# Altium footprint library PcbLib1.PcbLib: 332 footprints (part 7 of 22)
Each footprint in its own frame and in the unit in brackets; x right, y up, seen from the top. Pads: shape width x height; smd on the part's side, far side on the other; paste and mask are expansions set on the pad; w line width, h text height; cw(c..) or ccw(c..) is an arc to the next point about the centre after c.
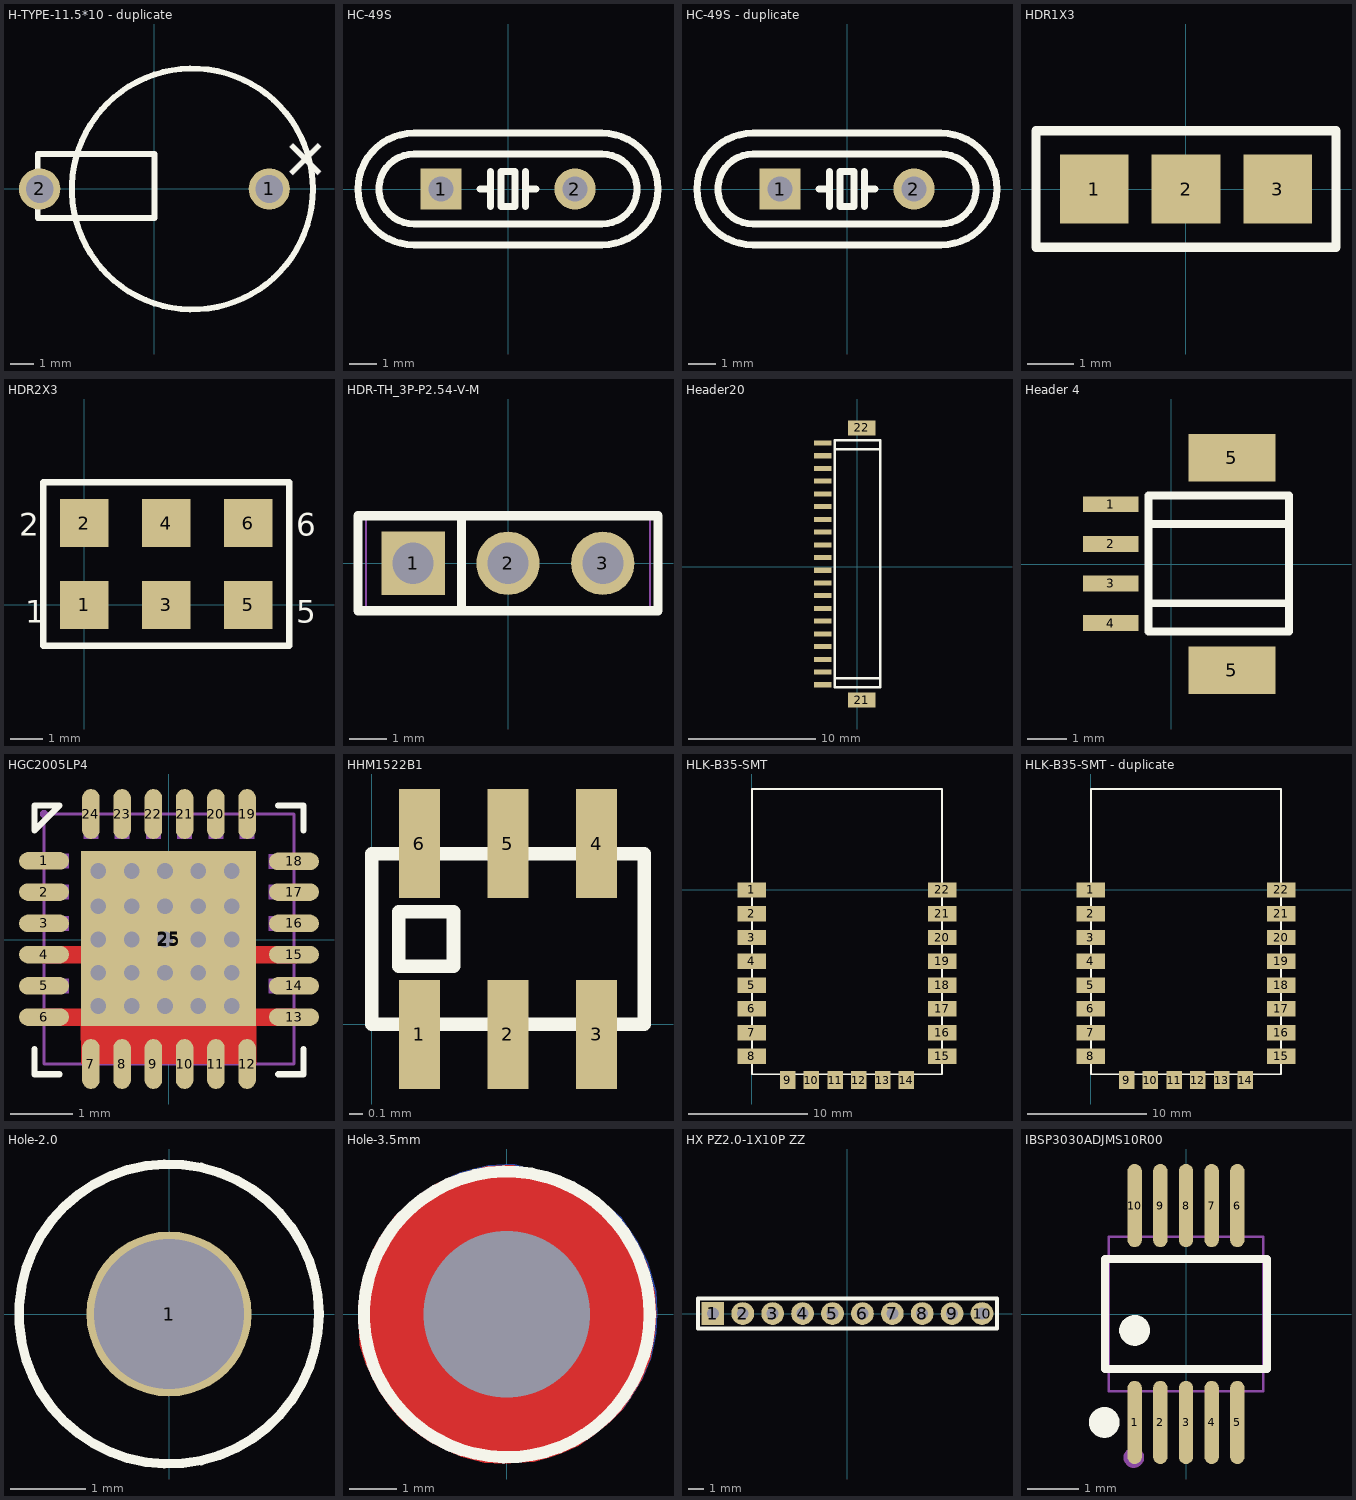
[diagram p6: the footprints below, top view; thin cyan lines are the x and y axes]

## H-TYPE-11.5*10 - duplicate [mm]
pads (2):
  round 1.8 hole 1.2: 1(5,0) 2(-5,0)
Top Overlay:
  circle w0.254: c1.65,0 r5.25
  lines w0.254: -5.08,-1.27 -5.08,1.524 0,1.524 0,-1.27 -5.08,-1.27
  text "+" at 5.135,1.499 h2.03

## HC-49S [mm]
pads (2):
  rect 1.5x1.5 hole 0.9: 1(-2.439,0)
  round 1.5 hole 0.9: 2(2.438,0)
Top Overlay:
  lines w0.254: -1.016,0 -0.635,0 ; -0.635,-0.635 -0.635,0 ; -0.635,0.635 -0.635,0 ; 0.635,-0.635 0.635,0 ; 0.635,0.635 0.635,0 ; 1.016,0 0.635,0 ; -5.109,-1.143 cw(c-3.429,0) -5.109,1.143 cw(c-3.429,0) -3.429,2.032 3.429,2.032 cw(c3.429,0) 5.109,1.143 cw(c3.429,0) 5.109,-1.143 cw(c3.429,0) 3.429,-2.032 -3.429,-2.032 cw(c-3.429,0) -5.109,-1.143 ; -3.983,-1.143 cw(c-3.429,0) -3.983,1.143 cw(c-3.429,0) -3.429,1.27 3.429,1.27 cw(c3.429,0) 3.983,1.143 cw(c3.429,0) 3.983,-1.143 cw(c3.429,0) 3.429,-1.27 -3.429,-1.27 cw(c-3.429,0) -3.983,-1.143 ; -0.254,-0.635 0.254,-0.635 0.254,0.635 -0.254,0.635 -0.254,-0.635

## HC-49S - duplicate [mm]
pads (2):
  rect 1.5x1.5 hole 0.9: 1(-2.439,0)
  round 1.5 hole 0.9: 2(2.438,0)
Top Overlay:
  lines w0.254: -1.016,0 -0.635,0 ; -0.635,-0.635 -0.635,0 ; -0.635,0.635 -0.635,0 ; 0.635,-0.635 0.635,0 ; 0.635,0.635 0.635,0 ; 1.016,0 0.635,0 ; -5.109,-1.143 cw(c-3.429,0) -5.109,1.143 cw(c-3.429,0) -3.429,2.032 3.429,2.032 cw(c3.429,0) 5.109,1.143 cw(c3.429,0) 5.109,-1.143 cw(c3.429,0) 3.429,-2.032 -3.429,-2.032 cw(c-3.429,0) -5.109,-1.143 ; -3.983,-1.143 cw(c-3.429,0) -3.983,1.143 cw(c-3.429,0) -3.429,1.27 3.429,1.27 cw(c3.429,0) 3.983,1.143 cw(c3.429,0) 3.983,-1.143 cw(c3.429,0) 3.429,-1.27 -3.429,-1.27 cw(c-3.429,0) -3.983,-1.143 ; -0.254,-0.635 0.254,-0.635 0.254,0.635 -0.254,0.635 -0.254,-0.635

## HDR1X3 [mm]
height 2.54
pads (3):
  rect 1.5x1.5 smd: 1(-2,0) 2(0,0) 3(2,0)
Top Overlay:
  lines w0.2: -3.27,-1.27 -3.27,1.27 3.27,1.27 3.27,-1.27 -3.27,-1.27

## HDR2X3 [mm] "Connector; Header; 3x2 Position"
height 2.54
pads (6):
  rect 1.5x1.5 smd: 1(0,0) 2(0,2.54) 3(2.54,0) 4(2.54,2.54) 5(5.08,0) 6(5.08,2.54)
Top Overlay:
  lines w0.2: 1.482,-1.27 6.35,-1.27 ; 6.35,-1.27 -1.27,-1.27 -1.27,3.81 6.35,3.81 6.35,-1.27
  text "1" at -1.821,-0.551 h0.7
  text "2" at -2.021,2.149 h0.7
  text "5" at 6.579,-0.551 h0.7
  text "6" at 6.579,2.149 h0.7

## HDR-TH_3P-P2.54-V-M [mm]
pads (3):
  rect 1.7x1.7 hole 1.1 paste-2539.97 mask+0.051: 1(-2.54,0)
  round 1.7 hole 1.1 paste-2539.97 mask+0.051: 2(0,0) 3(2.54,0)
Top Overlay:
  lines w0.254: -1.246,-1.27 -1.246,1.27 ; -4.02,-1.27 -4.02,1.27 4.02,1.27 4.02,-1.27 -4.02,-1.27
Mechanical 15:
  region: -2.86,0.32 -2.22,0.32 -2.22,-0.32 -2.86,-0.32
  region: -0.32,0.32 0.32,0.32 0.32,-0.32 -0.32,-0.32
  region: 2.22,0.32 2.86,0.32 2.86,-0.32 2.22,-0.32
  region: -3.75,-1.25 -3.75,-1.225 -3.785,-1.19 -3.835,-1.19 -3.87,-1.225 -3.87,-1.25 -3.87,-1.275 -3.835,-1.31 -3.785,-1.31 -3.75,-1.275 -3.75,-1.25
  lines w0.051: -3.81,-1.25 3.81,-1.25 3.81,1.25 -3.81,1.25 -3.81,-1.25

## Header20 [mm]
pads (22):
  rect 1.4x0.4 smd: 1(-2.692,9.73) 2(-2.692,8.73) 3(-2.692,7.73) 4(-2.692,6.73) 5(-2.692,5.73) 6(-2.692,4.73) 7(-2.692,3.73) 8(-2.692,2.73) 9(-2.692,1.73) 10(-2.692,0.73) 11(-2.692,-0.27) 12(-2.692,-1.27) 13(-2.692,-2.27) 14(-2.692,-3.27) 15(-2.692,-4.27) 16(-2.692,-5.27) 17(-2.692,-6.27) 18(-2.692,-7.27) 19(-2.692,-8.27) 20(-2.692,-9.27)
  rect 2.2x1.2 smd: 21(0.37,-10.47) 22(0.37,10.913)
Top Overlay:
  lines w0.2: -1.737,-9.48 1.813,-9.48 1.813,9.93 ; -1.737,-9.47 -1.737,9.95 1.813,9.95 ; -1.737,-8.77 1.813,-8.77 ; -1.667,9.23 1.813,9.23

## Header 4 [mm]
pads (6):
  rect 1.4x0.4 smd: 1(-1.531,1.508) 2(-1.531,0.508) 3(-1.531,-0.492) 4(-1.531,-1.492)
  rect 2.2x1.2 smd: 5(1.531,-2.692) 5(1.531,2.692)
Top Overlay:
  lines w0.2: -0.576,-0.992 2.974,-0.992 ; -0.506,1.008 2.974,1.008 ; 2.974,1.708 2.974,-1.702 -0.576,-1.702 -0.576,1.728 2.974,1.728

## HGC2005LP4 [mm] "数控衰减器"
pads (26):
  oval 0.8x0.28 smd mask+0: 1(-2,1.262) 2(-2,0.763) 3(-2,0.262) 4(-2,-0.237) 5(-2,-0.738) 6(-2,-1.237) 13(2,-1.237) 14(2,-0.738) 15(2,-0.237) 16(2,0.262) 17(2,0.763) 18(2,1.255)
  oval 0.28x0.8 smd mask+0: 7(-1.25,-1.988) 8(-0.75,-1.988) 9(-0.25,-1.988) 10(0.25,-1.988) 11(0.75,-1.988) 12(1.25,-1.988) 19(1.25,2.012) 20(0.75,2.012) 21(0.25,2.012) 22(-0.25,2.012) 23(-0.75,2.012) 24(-1.25,2.012)
  rect 2.8x2.8 smd mask+0: 25(-0.007,0.022)
  rect 2.7x2.7 smd mask+0: 25(0,0)
via -1.13,-1.059 diameter 0.4 hole 0.25
via -0.596,-1.059 diameter 0.4 hole 0.25
via -0.063,-1.059 diameter 0.4 hole 0.25
via 0.47,-1.059 diameter 0.4 hole 0.25
via -0.063,-0.528 diameter 0.4 hole 0.25
via -1.13,-0.528 diameter 0.4 hole 0.25
via -0.596,-0.528 diameter 0.4 hole 0.25
via -1.13,0.004 diameter 0.4 hole 0.25
via -0.063,0.004 diameter 0.4 hole 0.25
via -0.596,0.004 diameter 0.4 hole 0.25
via -0.063,0.536 diameter 0.4 hole 0.25
via -1.13,0.536 diameter 0.4 hole 0.25
via -0.596,1.1 diameter 0.4 hole 0.25
via -0.596,0.536 diameter 0.4 hole 0.25
via -0.063,1.1 diameter 0.4 hole 0.25
via 0.47,1.1 diameter 0.4 hole 0.25
via -1.13,1.1 diameter 0.4 hole 0.25
via 1.003,-1.059 diameter 0.4 hole 0.25
via 0.47,-0.528 diameter 0.4 hole 0.25
via 1.003,0.004 diameter 0.4 hole 0.25
via 1.003,-0.528 diameter 0.4 hole 0.25
via 0.47,0.004 diameter 0.4 hole 0.25
via 0.47,0.536 diameter 0.4 hole 0.25
via 1.003,0.536 diameter 0.4 hole 0.25
via 1.003,1.1 diameter 0.4 hole 0.25
Top Layer:
  region: -1.408,-1.237 1.393,-1.237 1.393,-1.987 -1.407,-1.987
  lines w0.28: -2,-1.237 -1.408,-1.237 ; -2,-0.237 -1.345,-0.237 ; 1.346,-0.237 2,-0.237 ; 1.393,-1.237 2,-1.237
Top Overlay:
  lines w0.1: -2.15,-1.75 -2.15,-2.15 -1.75,-2.15 ; 1.75,-2.15 2.15,-2.15 2.15,-1.75 ; 1.75,2.15 2.15,2.15 2.15,1.75 ; -2.15,1.75 -2.15,2.15 -1.75,2.15 -2.15,1.75 ; -2.15,1.75 -2.15,1.75
Top Paste:
  drawing of 26 lines, arcs and shapes, not listed
Mechanical 15:
  region: 1.135,2.013 1.365,2.013 1.365,1.613 1.135,1.613
  region: 0.635,2.013 0.865,2.013 0.865,1.613 0.635,1.613
  region: 0.135,2.013 0.365,2.013 0.365,1.613 0.135,1.613
  region: -0.365,2.013 -0.135,2.013 -0.135,1.613 -0.365,1.613
  region: -0.865,2.013 -0.635,2.013 -0.635,1.613 -0.865,1.613
  region: -1.365,2.013 -1.135,2.013 -1.135,1.613 -1.365,1.613
  region: -1.6,1.377 -1.6,1.147 -2,1.147 -2,1.377
  region: -1.6,0.878 -1.6,0.647 -2,0.647 -2,0.878
  region: -1.6,0.377 -1.6,0.147 -2,0.147 -2,0.377
  region: -1.6,-0.122 -1.6,-0.353 -2,-0.353 -2,-0.122
  region: -1.6,-0.623 -1.6,-0.853 -2,-0.853 -2,-0.623
  region: -1.6,-1.122 -1.6,-1.352 -2,-1.352 -2,-1.122
  region: -1.365,-1.587 -1.135,-1.587 -1.135,-1.987 -1.365,-1.987
  region: -0.865,-1.587 -0.635,-1.587 -0.635,-1.987 -0.865,-1.987
  region: -0.365,-1.587 -0.135,-1.587 -0.135,-1.987 -0.365,-1.987
  region: 0.135,-1.587 0.365,-1.587 0.365,-1.987 0.135,-1.987
  region: 0.635,-1.587 0.865,-1.587 0.865,-1.987 0.635,-1.987
  region: 1.135,-1.587 1.365,-1.587 1.365,-1.987 1.135,-1.987
  region: 2,-1.125 2,-1.355 1.6,-1.355 1.6,-1.125
  region: 2,-0.623 2,-0.853 1.6,-0.853 1.6,-0.623
  region: 2,-0.122 2,-0.353 1.6,-0.353 1.6,-0.122
  region: 2,0.377 2,0.147 1.6,0.147 1.6,0.377
  region: 2,0.878 2,0.647 1.6,0.647 1.6,0.878
  region: 2,1.37 2,1.139 1.6,1.139 1.6,1.37
  region: -1.35,1.35 1.35,1.35 1.35,-1.35 -1.35,-1.35
  region: -1.94,2.012 -1.94,2.037 -1.975,2.072 -2.025,2.072 -2.06,2.037 -2.06,2.012 -2.06,1.988 -2.025,1.952 -1.975,1.952 -1.94,1.988 -1.94,2.012
  lines w0.051: -2,-1.987 -2,2.013 2,2.013 2,-1.987 -2,-1.987

## HHM1522B1 [mm]
height 2.54
pads (6):
  rect 0.3x0.8 smd: 1(0.35,-0.075) 2(1,-0.075) 3(1.65,-0.075) 4(1.65,1.325) 5(1,1.325) 6(0.35,1.325)
Top Overlay:
  lines w0.1: 0,0 2,0 2,1.25 0,1.25 0,0 ; 0.2,0.425 0.2,0.825 0.6,0.825 0.6,0.425 0.2,0.425

## HLK-B35-SMT [mm]
pads (22):
  rect 2.4x1.3 smd: 1(0,0) 2(0,-2) 3(0,-4) 4(0,-6) 5(0,-8) 6(0,-10) 7(0,-12) 8(0,-14) 15(16,-14) 16(16,-12) 17(16,-10) 18(16,-8) 19(16,-6) 20(16,-4) 21(16,-2) 22(16,0)
  rect 1.3x1.5 smd: 9(3,-16) 10(5,-16) 11(7,-16) 12(9,-16) 13(11,-16) 14(13,-16)
Top Overlay:
  lines w0.15: 0,-15.5 16,-15.5 16,8.5 0,8.5 0,-15.5

## HLK-B35-SMT - duplicate [mm]
pads (22):
  rect 2.4x1.3 smd: 1(0,0) 2(0,-2) 3(0,-4) 4(0,-6) 5(0,-8) 6(0,-10) 7(0,-12) 8(0,-14) 15(16,-14) 16(16,-12) 17(16,-10) 18(16,-8) 19(16,-6) 20(16,-4) 21(16,-2) 22(16,0)
  rect 1.3x1.5 smd: 9(3,-16) 10(5,-16) 11(7,-16) 12(9,-16) 13(11,-16) 14(13,-16)
Top Overlay:
  lines w0.15: 0,-15.5 16,-15.5 16,8.5 0,8.5 0,-15.5

## Hole-2.0 [mm]
height 1
pads (1):
  round 2.2 hole 2: 1(0,0)
Top Overlay:
  circle w0.127: c0,0 r2
Bottom Overlay:
  circle w0.127: c0,0 r2
Mechanical 1:
  circle w0.127: c0,0 r1

## Hole-3.5mm [mm]
height 0.9
pads (1):
  round 0 hole 3.5 mask+0: 1(0,0)
Top Layer:
  pour cut-out: -0.015,3.133 0.143,3.133 0.595,3.006 1.205,2.828 1.738,2.548 2.373,2.015 2.703,1.532 2.932,1.075 3.11,0.466 3.135,0.008 3.11,-0.423 3.008,-0.931 2.83,-1.363 2.602,-1.744 2.424,-1.998 2.144,-2.278 1.84,-2.532 1.509,-2.76 1.154,-2.913 0.874,-3.014 0.57,-3.09 0.239,-3.116 -0.065,-3.141 -0.472,-3.116 -0.954,-2.989 -1.31,-2.836 -1.64,-2.659 -1.97,-2.43 -2.224,-2.201 -2.428,-1.973 -2.605,-1.719 -2.783,-1.414 -2.961,-1.033 -3.088,-0.652 -3.113,-0.22 -3.113,0.262 -3.037,0.72 -2.91,1.075 -2.783,1.405 -2.58,1.761 -2.351,2.066 -2.072,2.32 -1.793,2.548 -1.564,2.701 -1.31,2.828 -1.005,2.955 -0.726,3.031 -0.421,3.107 -0.065,3.133
Bottom Layer:
  pour cut-out: 0.011,3.158 0.169,3.158 0.62,3.031 1.23,2.853 1.763,2.574 2.398,2.04 2.729,1.558 2.957,1.101 3.135,0.491 3.16,0.034 3.135,-0.398 3.033,-0.906 2.856,-1.338 2.627,-1.719 2.449,-1.973 2.17,-2.252 1.865,-2.506 1.535,-2.735 1.179,-2.887 0.9,-2.989 0.595,-3.065 0.265,-3.09 -0.04,-3.116 -0.446,-3.09 -0.929,-2.963 -1.285,-2.811 -1.615,-2.633 -1.945,-2.405 -2.199,-2.176 -2.402,-1.947 -2.58,-1.693 -2.758,-1.389 -2.936,-1.008 -3.063,-0.627 -3.088,-0.195 -3.088,0.288 -3.012,0.745 -2.885,1.101 -2.758,1.431 -2.555,1.786 -2.326,2.091 -2.047,2.345 -1.767,2.574 -1.539,2.726 -1.285,2.853 -0.98,2.98 -0.7,3.056 -0.396,3.133 -0.04,3.158
Top Overlay:
  circle w0.254: c0,0 r3
Bottom Overlay:
  circle w0.254: c0,0 r3

## HX PZ2.0-1X10P ZZ [mil]
pads (10):
  rect 60x60 hole 31.5: 1(-354.33,0)
  round 60 hole 31.5: 2(-275.59,0) 3(-196.85,0) 4(-118.11,0) 5(-39.37,0) 6(39.37,0) 7(118.11,0) 8(196.85,0) 9(275.59,0) 10(354.33,0)
Top Overlay:
  lines w10: -393.7,-39.37 393.7,-39.37 393.7,39.37 -393.7,39.37 -393.7,-39.37
Mechanical 6:
  lines w2: -393.7,-39.37 -393.7,39.37 393.7,39.37 393.7,-39.37 -393.7,-39.37
Mechanical 8:
  region: -391.34,-39.37 -391.34,-40.35 -392.72,-41.73 -394.68,-41.73 -396.06,-40.35 -396.06,-39.37 -396.06,-38.39 -394.68,-37.01 -392.72,-37.01 -391.34,-38.39 -391.34,-39.37
Mechanical 9:
  region: -364.17,9.84 -344.49,9.84 -344.49,-9.84 -364.17,-9.84
  region: -285.43,9.84 -265.75,9.84 -265.75,-9.84 -285.43,-9.84
  region: -206.69,9.84 -187.01,9.84 -187.01,-9.84 -206.69,-9.84
  region: -127.95,9.84 -108.27,9.84 -108.27,-9.84 -127.95,-9.84
  region: -49.21,9.84 -29.53,9.84 -29.53,-9.84 -49.21,-9.84
  region: 29.53,9.84 49.21,9.84 49.21,-9.84 29.53,-9.84
  region: 108.27,9.84 127.95,9.84 127.95,-9.84 108.27,-9.84
  region: 187.01,9.84 206.69,9.84 206.69,-9.84 187.01,-9.84
  region: 265.75,9.84 285.43,9.84 285.43,-9.84 265.75,-9.84
  region: 344.49,9.84 364.17,9.84 364.17,-9.84 344.49,-9.84

## IBSP3030ADJMS10R00 [mm]
pads (10):
  oval 0.28x1.62 smd: 1(-1,-2.11) 2(-0.5,-2.11) 3(0,-2.11) 4(0.5,-2.11) 5(1,-2.11) 6(1,2.11) 7(0.5,2.11) 8(0,2.11) 9(-0.5,2.11) 10(-1,2.11)
Top Overlay:
  circle w0.3: c-1,-0.319 r0.15
  circle w0.3: c-1.592,-2.11 r0.15
  lines w0.152: -1.576,-1.071 -1.576,1.071 1.576,1.071 1.576,-1.071 -1.576,-1.071
Mechanical 2:
  circle w0.2: c-1.016,-2.794 r0.1
Mechanical 6:
  lines w0.051: -1.5,-1.5 -1.5,1.5 1.5,1.5 1.5,-1.5 -1.5,-1.5
Mechanical 7:
  region: -1.112,-1.91 -1.112,-1.49 -0.888,-1.49 -0.888,-1.91
  region: -0.612,-1.91 -0.612,-1.49 -0.388,-1.49 -0.388,-1.91
  region: -0.112,-1.91 -0.112,-1.49 0.112,-1.49 0.112,-1.91
  region: 0.388,-1.91 0.388,-1.49 0.612,-1.49 0.612,-1.91
  region: 0.888,-1.91 0.888,-1.49 1.112,-1.49 1.112,-1.91
  region: -1.112,1.91 -1.112,1.49 -0.888,1.49 -0.888,1.91
  region: -0.612,1.91 -0.612,1.49 -0.388,1.49 -0.388,1.91
  region: -0.112,1.91 -0.112,1.49 0.112,1.49 0.112,1.91
  region: 0.388,1.91 0.388,1.49 0.612,1.49 0.612,1.91
  region: 0.888,1.91 0.888,1.49 1.112,1.49 1.112,1.91
Mechanical 9:
  region: -1.112,-2.45 -1.112,-1.9 -0.888,-1.9 -0.888,-2.45
  region: -0.612,-2.45 -0.612,-1.9 -0.388,-1.9 -0.388,-2.45
  region: -0.112,-2.45 -0.112,-1.9 0.112,-1.9 0.112,-2.45
  region: 0.388,-2.45 0.388,-1.9 0.612,-1.9 0.612,-2.45
  region: 0.888,-2.45 0.888,-1.9 1.112,-1.9 1.112,-2.45
  region: -1.112,2.45 -1.112,1.9 -0.888,1.9 -0.888,2.45
  region: -0.612,2.45 -0.612,1.9 -0.388,1.9 -0.388,2.45
  region: -0.112,2.45 -0.112,1.9 0.112,1.9 0.112,2.45
  region: 0.388,2.45 0.388,1.9 0.612,1.9 0.612,2.45
  region: 0.888,2.45 0.888,1.9 1.112,1.9 1.112,2.45